# Altium schematic symbol library ind.SchLib: 8 symbols
Pins are listed as number, name and electrical type; pins without a type are passive.

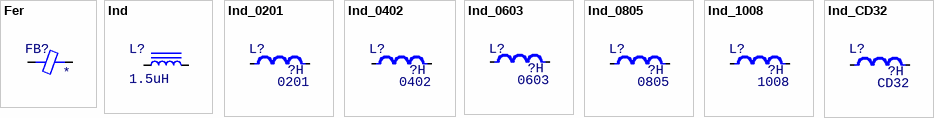
[diagram p0: symbols Fer to Ind_CD32]

## Fer
designator FB?
Ferrite Bead
footprint FER 0201/0603 (Chip Inductor, 2-Leads, Body 0.60x0.30mm, IPC Medium Density)
footprint FER 0402/1005 (Chip Ferrite, 2-Leads, Body 1.02x0.51mm, IPC Medium Density)
footprint FER 0603/1608 (Chip Ferrite, 2-Leads, Body 1.60x0.80mm, IPC Medium Density)
footprint FER 0805/2012 (Chip Ferrite, 2-Leads, Body 2.00x1.20mm, IPC Medium Density)
pins: 1, 2

## Ind
designator L?, comment 1.5uH
Inductor; Value: 1.5uH
footprint WURTH 5040 (Wire Wound Inductor, 2-Leads, Body 5.60x5.30mm, IPC Medium Density)
footprint BOURNS SRP5030T (Precision Wire Wound Inductor, 2-Leads, Body 5.70x5.20mm, IPC Medium Density)
footprint WURTH WE-HCI 7040
footprint WURTH WE-HCI 7050
pins: 1, 2

## Ind_0201
designator L?, comment value ?H  Type: 0201  (hidden comment: H0201)
Inductor; Specification: ±5% 100mA; Manufacturer: *
footprint IND_0201
pins: 1, 2

## Ind_0402
designator L?, comment value ?H  Type: 0402  (hidden comment: H0402)
Inductor; Specification: ±5% 100mA; Manufacturer: *
footprint IND_0402
pins: 1, 2

## Ind_0603
designator L?, comment value ?H  Type: 0603  (hidden comment: H0603)
Inductor; Specification: ±5% 100mA; Manufacturer: *
footprint IND_0603
pins: 1, 2

## Ind_0805
designator L?, comment value ?H  Type: 0805  (hidden comment: H0805)
Inductor; Specification: ±5% 100mA; Manufacturer: *
footprint IND_0805
pins: 1, 2

## Ind_1008
designator L?, comment value ?H  Type: 1008  (hidden comment: H1008)
Inductor; Specification: ±5% 100mA; Manufacturer: *
footprint IND_1008
pins: 1, 2

## Ind_CD32
designator L?, comment value ?H  (hidden comment: CD32)
Inductor; Specification: ±5% 100mA; Manufacturer: *; Type: CD32
footprint IND CD32
pins: 1, 2